# Altium schematic symbol library PSA-5454+.SchLib: 1 symbol
Pins are listed as number, name and electrical type; pins without a type are passive.

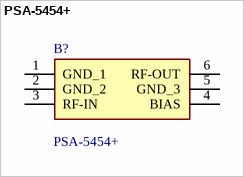
[diagram p0: symbol PSA-5454+]

## PSA-5454+
designator B?
RF Amplifier ML AMPL / SURF MOUNT / RoHS; Manufacturer_Name: Mini-Circuits; Geometry.Height: 1mm; Mouser Part Number: 139-PSA-5454; Mouser Price/Stock: https://www.mouser.co.uk/ProductDetail/Mini-Circuits/PSA-5454%2b?qs=xZ%2FP%252Ba9zWqZ7vOHZyPwVpA%3D%3D; Manufacturer_Part_Number: PSA-5454+; Datasheet Link: https://www.minicircuits.com/pdfs/PSA-5454+.pdf
footprint SOT65P215X100-6N
pins: 1 GND_1, 2 GND_2, 3 RF-IN, 4 BIAS, 5 GND_3, 6 RF-OUT